# EAGLE library part INA226-MODULE (library moto-core)
INA226-MODULE INA226 (CJMCU-226) I2C akim/guc izleme, 0.1R shunt. VBUS ayri pin. Kart: 20.5 x 19.4 mm - Guven: M STEP: GrabCAD 'INA226 CJMCU'
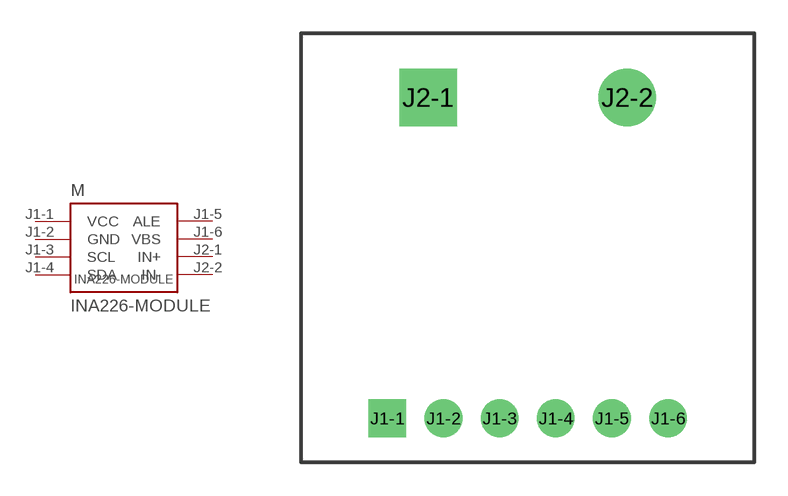
[diagram p3: symbol with the pads of INA226-MODULE; footprint INA226-MODULE]

Designator prefix M

## INA226-MODULE (BOARD_SIZE: 20.5x19.4mm; CONFIDENCE: M)  [INA226-MODULE]
J1-1  VCC  pas
J1-2  GND  pas
J1-3  SCL  pas
J1-4  SDA  pas
J1-5  ALE  pas
J1-6  VBS  pas
J2-1  IN+  pas
J2-2  IN-  pas

## Footprint INA226-MODULE (pad centres in mm)
INA226 (CJMCU-226) I2C akim/guc izleme, 0.1R shunt. VBUS ayri pin. | Kart: 20.5 x 19.4 mm | Guven: M
drill 1 pad 1.7 square: J1-1 -6.35,-7.7
drill 1 pad 1.7 round: J1-2 -3.81,-7.7; J1-3 -1.27,-7.7; J1-4 1.27,-7.7; J1-5 3.81,-7.7; J1-6 6.35,-7.7
drill 1.3 pad 2.6 square: J2-1 -4.5,6.8
drill 1.3 pad 2.6 round: J2-2 4.5,6.8